# Altium footprint library actuator-driver.PcbLib: 21 footprints (part 2 of 2)
Each footprint in its own frame and in the unit in brackets; x right, y up, seen from the top. Pads: shape width x height; smd on the part's side, far side on the other; paste and mask are expansions set on the pad; w line width, h text height; cw(c..) or ccw(c..) is an arc to the next point about the centre after c.
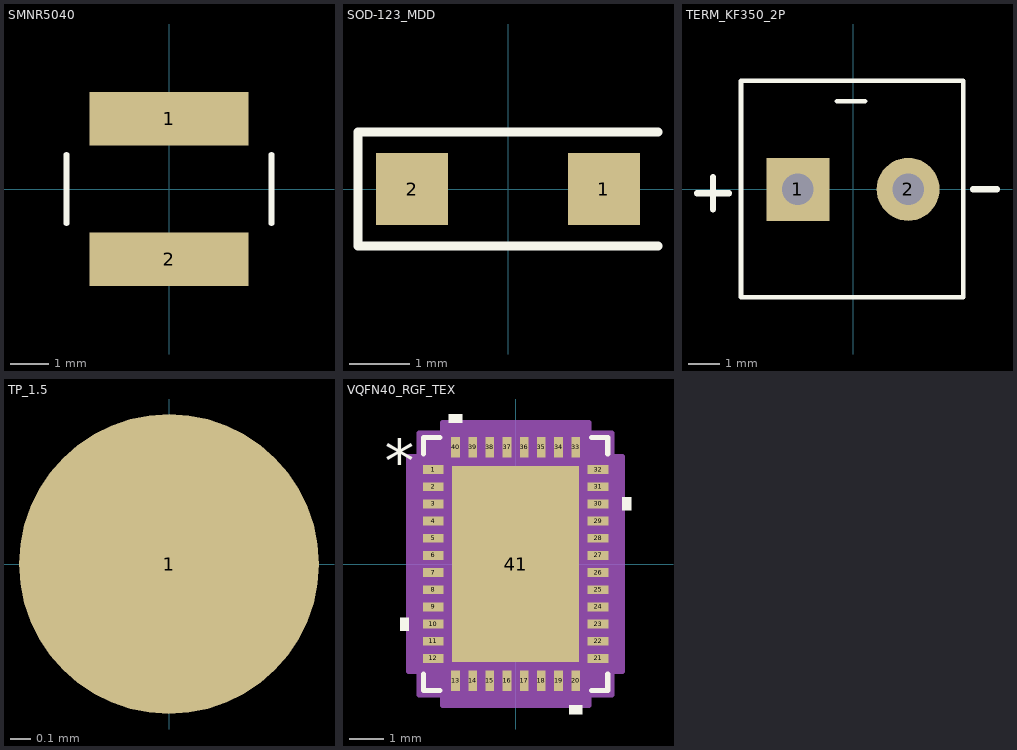
[diagram p1: the footprints below, top view; thin cyan lines are the x and y axes]

## SMNR5040 [mm]
pads (2):
  rect 4.2x1.4 smd mask+0.05: 1(0,1.85) 2(0,-1.85)
Top Overlay:
  lines w0.15: -2.7,-0.9 -2.7,0.9 ; 2.7,-0.9 2.7,0.9
3D body: height 4, standoff 0, extent -2.5,-2.5 2.5,2.5

## SOD-123_MDD [mm]
pads (2):
  rect 1.2x1.2 smd mask+0.05: 1(1.6,0) 2(-1.6,0)
Top Overlay:
  lines w0.15: 2.5,-0.95 -2.5,-0.95 -2.5,0.95 2.5,0.95
3D body: height 1.1, standoff 0, extent -1.35,-0.8 1.35,0.8

## TERM_KF350_2P [mm]
pads (2):
  rect 2x2 hole 1 mask+0.05: 1(-1.75,0)
  round 2 hole 1 mask+0.05: 2(1.75,0)
Top Overlay:
  lines w0.15: -0.508,2.794 0.381,2.794 ; -3.556,-3.429 3.5,-3.429 3.5,3.45 -3.556,3.45 -3.556,-3.429
  lines w0.2: -4.953,-0.127 -3.937,-0.127 ; -4.445,-0.635 -4.445,0.381 ; 3.81,0 4.572,0
3D body: height 8.8, standoff 0, extent -3.5,-3.45 3.5,3.45

## TP_1.5 [mm]
pads (1):
  round 1.5 smd paste-2539.97 mask+0.05: 1(0,0)

## VQFN40_RGF_TEX [mm]
pads (41):
  rect 0.6x0.254 smd paste+0 mask+0.05: 1(-2.4,2.751) 2(-2.4,2.251) 3(-2.4,1.75) 4(-2.4,1.25) 5(-2.4,0.75) 6(-2.4,0.25) 7(-2.4,-0.25) 8(-2.4,-0.75) 9(-2.4,-1.25) 10(-2.4,-1.75) 11(-2.4,-2.251) 12(-2.4,-2.751) 21(2.4,-2.751) 22(2.4,-2.251) 23(2.4,-1.75) 24(2.4,-1.25) 25(2.4,-0.75) 26(2.4,-0.25) 27(2.4,0.25) 28(2.4,0.75) 29(2.4,1.25) 30(2.4,1.75) 31(2.4,2.251) 32(2.4,2.751)
  rect 0.254x0.6 smd paste+0 mask+0.05: 13(-1.75,-3.4) 14(-1.25,-3.4) 15(-0.75,-3.4) 16(-0.25,-3.4) 17(0.25,-3.4) 18(0.75,-3.4) 19(1.25,-3.4) 20(1.75,-3.4) 33(1.75,3.4) 34(1.25,3.4) 35(0.75,3.4) 36(0.25,3.4) 37(-0.25,3.4) 38(-0.75,3.4) 39(-1.25,3.4) 40(-1.75,3.4)
  rect 3.7x5.7 smd paste-1.905 mask+0.05: 41(0,0)
Top Overlay:
  region: -1.56,4.115 -1.941,4.115 -1.941,4.369 -1.56,4.369
  region: 3.111,1.941 3.365,1.941 3.365,1.56 3.111,1.56
  region: 1.941,-4.115 1.56,-4.115 1.56,-4.369 1.941,-4.369
  region: -3.111,-1.56 -3.365,-1.56 -3.365,-1.941 -3.111,-1.941
  lines w0.152: -2.68,-3.21 -2.68,-3.683 -2.21,-3.683 ; -2.68,3.21 -2.68,3.683 -2.21,3.683 ; 2.21,-3.683 2.68,-3.683 2.68,-3.21 ; 2.21,3.683 2.68,3.683 2.68,3.21
  text ".Designator" at -3.492,-0.635 h1.27
  text "*" at -3.81,2.366 h1.27
Top Paste:
  rectangle: 0.725,1.45 1.775,2.6
  rectangle: -0.525,0.1 0.525,1.25
  rectangle: -0.525,-1.25 0.525,-0.1
  rectangle: 0.725,0.1 1.775,1.25
  rectangle: -1.775,-1.25 -0.725,-0.1
  rectangle: -1.775,0.1 -0.725,1.25
  rectangle: -0.525,1.45 0.525,2.6
  rectangle: 0.725,-1.25 1.775,-0.1
  rectangle: -1.775,1.45 -0.725,2.6
  rectangle: -0.525,-2.6 0.525,-1.45
  rectangle: 0.725,-2.6 1.775,-1.45
  rectangle: -1.775,-2.6 -0.725,-1.45
Mechanical 13:
  lines w0.025: -2.553,2.286 -1.283,3.556 ; -2.553,-3.556 -2.553,3.556 2.553,3.556 2.553,-3.556 -2.553,-3.556 ; -2.553,-2.903 -2.553,-2.598 -2.553,-2.903 ; -2.553,-2.403 -2.553,-2.098 -2.553,-2.403 ; -2.553,-1.903 -2.553,-1.598 -2.553,-1.903 ; -2.553,-1.403 -2.553,-1.098 -2.553,-1.403 ; -2.553,-0.903 -2.553,-0.598 -2.553,-0.903 ; -2.553,-0.402 -2.553,-0.098 -2.553,-0.402 ; -2.553,0.098 -2.553,0.402 -2.553,0.098 ; -2.553,0.598 -2.553,0.903 -2.553,0.598 ; -2.553,1.098 -2.553,1.403 -2.553,1.098 ; -2.553,1.598 -2.553,1.903 -2.553,1.598 ; -2.553,2.098 -2.553,2.403 -2.553,2.098 ; -2.553,2.598 -2.553,2.903 -2.553,2.598 ; -1.903,-3.556 -1.598,-3.556 -1.903,-3.556 ; -1.903,3.556 -1.598,3.556 -1.903,3.556 ; -1.403,-3.556 -1.098,-3.556 -1.403,-3.556 ; -1.403,3.556 -1.098,3.556 -1.403,3.556 ; -0.903,-3.556 -0.598,-3.556 -0.903,-3.556 ; -0.903,3.556 -0.598,3.556 -0.903,3.556 ; -0.402,-3.556 -0.098,-3.556 -0.402,-3.556 ; -0.402,3.556 -0.098,3.556 -0.402,3.556 ; 0.098,-3.556 0.402,-3.556 0.098,-3.556 ; 0.098,3.556 0.402,3.556 0.098,3.556 ; 0.598,-3.556 0.903,-3.556 0.598,-3.556 ; 0.598,3.556 0.903,3.556 0.598,3.556 ; 1.098,-3.556 1.403,-3.556 1.098,-3.556 ; 1.098,3.556 1.403,3.556 1.098,3.556 ; 1.598,-3.556 1.903,-3.556 1.598,-3.556 ; 1.598,3.556 1.903,3.556 1.598,3.556 ; 2.553,-2.903 2.553,-2.598 2.553,-2.903 ; 2.553,-2.403 2.553,-2.098 2.553,-2.403 ; 2.553,-1.903 2.553,-1.598 2.553,-1.903 ; 2.553,-1.403 2.553,-1.098 2.553,-1.403 ; 2.553,-0.903 2.553,-0.598 2.553,-0.903 ; 2.553,-0.402 2.553,-0.098 2.553,-0.402 ; 2.553,0.098 2.553,0.402 2.553,0.098 ; 2.553,0.598 2.553,0.903 2.553,0.598 ; 2.553,1.098 2.553,1.403 2.553,1.098 ; 2.553,1.598 2.553,1.903 2.553,1.598 ; 2.553,2.098 2.553,2.403 2.553,2.098 ; 2.553,2.598 2.553,2.903 2.553,2.598
  text "*" at -2.362,2.366 h1.27
  text ".Designator" at -3.492,-0.635 h1.27
Mechanical 15:
  region: -2.131,-3.81 -2.807,-3.81 -2.807,-3.132 -3.111,-3.132 -3.111,3.132 -2.807,3.132 -2.807,3.81 -2.131,3.81 -2.131,4.115 2.131,4.115 2.131,3.81 2.807,3.81 2.807,3.132 3.111,3.132 3.111,-3.132 2.807,-3.132 2.807,-3.81 2.131,-3.81 2.131,-4.115 -2.131,-4.115
  lines w0.152: -3.111,-3.132 -3.111,3.132 -2.807,3.132 -2.807,3.81 -2.131,3.81 -2.131,4.115 2.131,4.115 2.131,3.81 2.807,3.81 2.807,3.132 3.111,3.132 3.111,-3.132 2.807,-3.132 2.807,-3.81 2.131,-3.81 2.131,-4.115 -2.131,-4.115 -2.131,-3.81 -2.807,-3.81 -2.807,-3.132 -3.111,-3.132
3D body "VQFN40_RGF_TEX.step": height 0.99, standoff 0, extent -2.553,-3.556 2.553,3.556